# Altium footprint library custom-case.PcbLib: 342 footprints (part 18 of 22)
Each footprint in its own frame and in the unit in brackets; x right, y up, seen from the top. Pads: shape width x height; smd on the part's side, far side on the other; paste and mask are expansions set on the pad; w line width, h text height; cw(c..) or ccw(c..) is an arc to the next point about the centre after c.
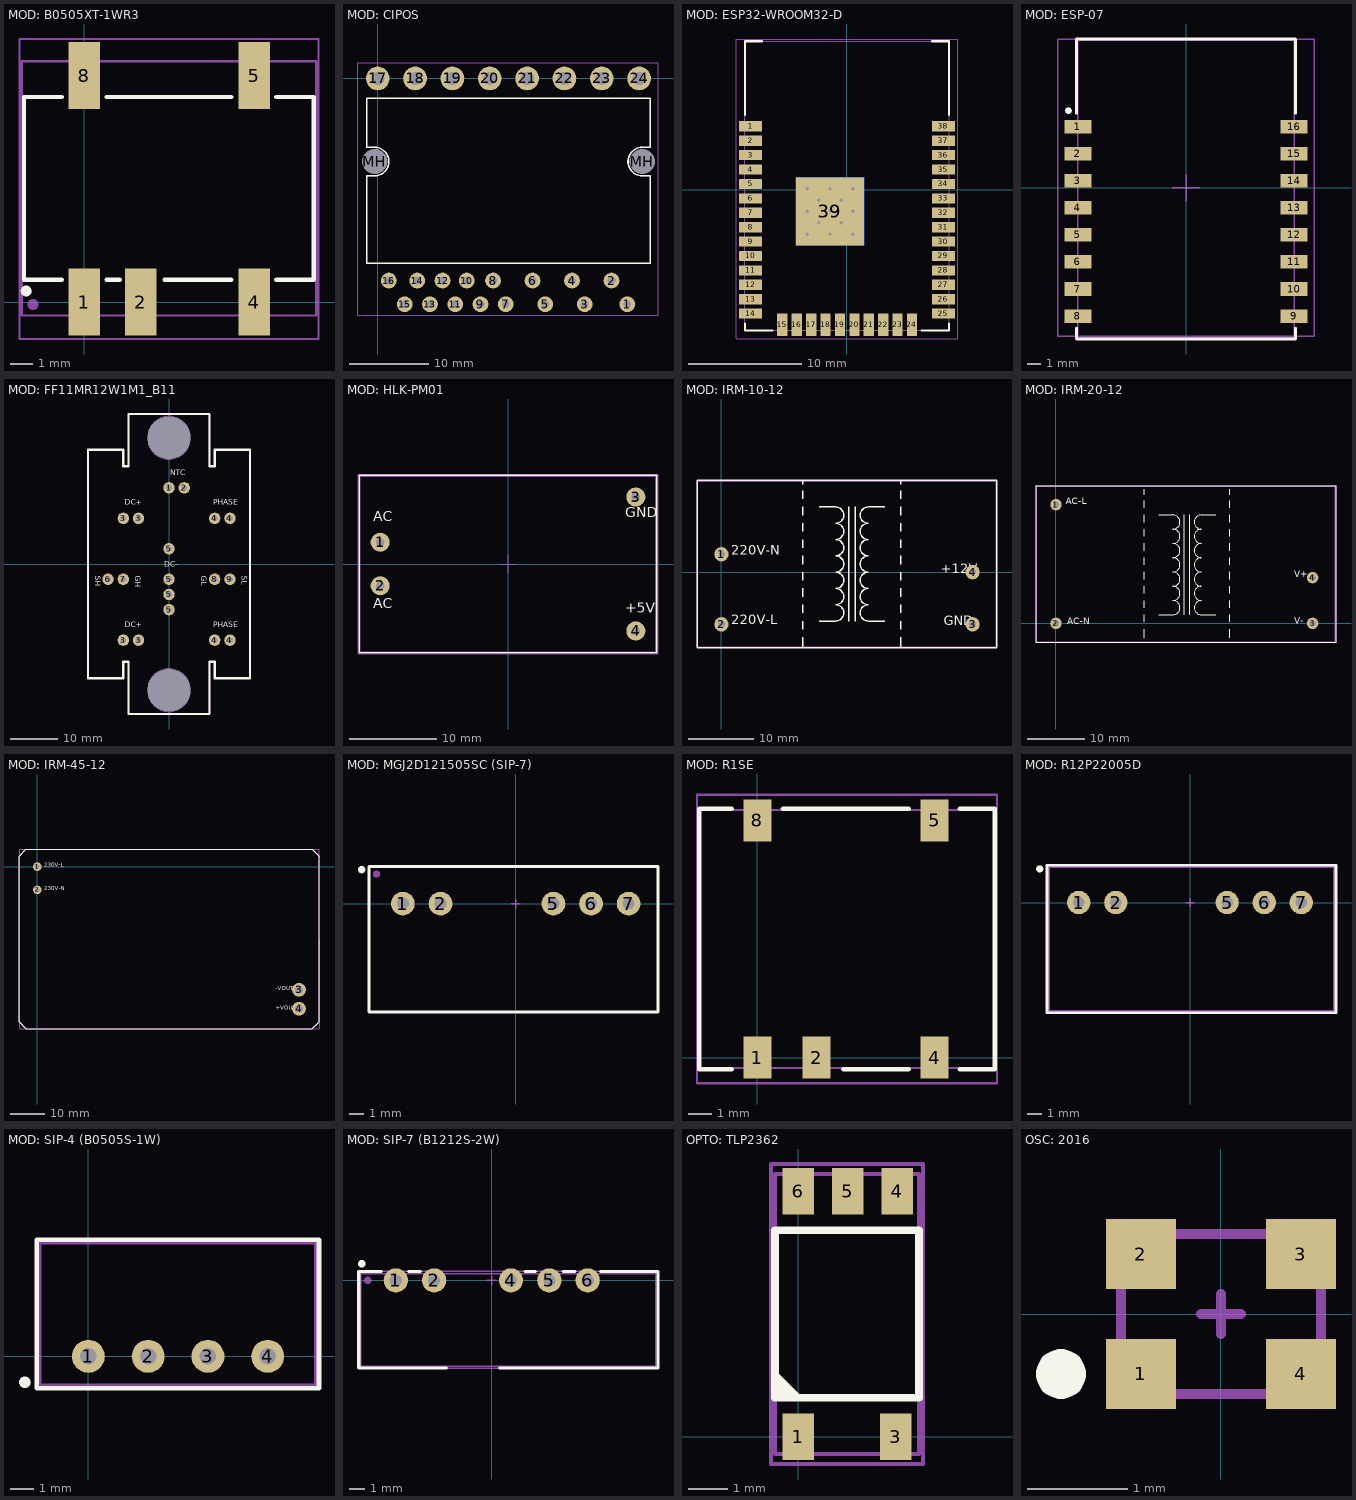
[diagram p17: the footprints below, top view; thin cyan lines are the x and y axes]

## MOD: B0505XT-1WR3 [mm]
pads (7):
  rect 1.4x3 smd: 1(0,0) 2(2.54,0) 4(7.62,0) 5(7.62,10.16) 8(0,10.16)
  round 0.5 on Top Overlay: ""(-2.6,0.5)
  round 0.5 on Mech1: ""(-2.3,-0.1)
Top Overlay:
  lines w0.2: -1,1 -2.7,1 -2.7,9.2 -1,9.2 ; 1,1 1.6,1 ; 1,9.2 6.6,9.2 ; 3.6,1 6.6,1 ; 8.62,1 10.3,1 10.3,9.2 8.62,9.2
Top Assy:
  lines w0.1: -2.8,-0.6 10.4,-0.6 10.4,10.8 -2.8,10.8 -2.8,-0.6
Size Area:
  lines w0.1: -2.897,-1.65 -2.897,11.8 0.4,11.8 10.5,11.8 10.5,-1.65 -2.897,-1.65
3D body "1WR3.STEP": height 7.25, standoff 0, extent -2.8,-0.6 10.4,10.8

## MOD: CIPOS [mm]
pads (26):
  round 2 hole 1 mask+0.075: 1(31.61,-28.6) 2(29.61,-25.6) 3(26.21,-28.6) 4(24.61,-25.6) 5(21.21,-28.6) 6(19.61,-25.6) 7(16.21,-28.6) 8(14.61,-25.6) 9(13.01,-28.6) 10(11.27,-25.6) 11(9.81,-28.6) 12(8.21,-25.6) 13(6.61,-28.6) 14(5.01,-25.6) 15(3.41,-28.6) 16(1.41,-25.6)
  round 3 hole 1.7 mask+0.075: 17(0,0) 18(4.73,0) 19(9.46,0) 20(14.19,0) 21(18.92,0) 22(23.65,0) 23(28.38,0) 24(33.11,0)
  round 3 hole 3.2 mask+0.075: MH(-0.39,-10.525) MH(33.5,-10.525)
Top Overlay:
  lines w0.2: -1.39,-23.4 -1.39,-12.325 -0.39,-12.325 ccw(c-0.39,-10.525) -0.39,-8.725 -1.39,-8.725 -1.39,-2.5 34.5,-2.5 34.5,-8.725 33.5,-8.725 ccw(c33.5,-10.525) 33.5,-12.325 34.5,-12.325 34.51,-23.4 -1.39,-23.4
Top Assy:
  lines w0.1: -1.39,-23.4 34.51,-23.4 34.5,-12.325 33.5,-12.325 cw(c33.5,-10.525) 33.5,-8.725 34.5,-8.725 34.5,-2.5 -1.39,-2.5 -1.39,-8.725 -0.39,-8.725 cw(c-0.39,-10.525) -0.39,-12.325 -1.39,-12.325 -1.39,-23.4
Size Area:
  lines w0.1: -2.5,-30 -2.5,2 35.5,2 35.5,-30 -2.5,-30
3D body "CIPOS.STEP": height 3.9, standoff -3.8, extent -1.59,-29.258 34.71,0.575

## MOD: ESP32-WROOM32-D [mm]
pads (40):
  rect 2x0.9 smd: 1(-8.5,5.6) 2(-8.5,4.33) 3(-8.5,3.06) 4(-8.5,1.79) 5(-8.5,0.52) 6(-8.5,-0.75) 7(-8.5,-2.02) 8(-8.5,-3.29) 9(-8.5,-4.56) 10(-8.5,-5.83) 11(-8.5,-7.1) 12(-8.5,-8.37) 13(-8.5,-9.64) 14(-8.5,-10.91) 25(8.5,-10.91) 26(8.5,-9.64) 27(8.5,-8.37) 28(8.5,-7.1) 29(8.5,-5.83) 30(8.5,-4.56) 31(8.5,-3.29) 32(8.5,-2.02) 33(8.5,-0.75) 34(8.5,0.52) 35(8.5,1.79) 36(8.5,3.06) 37(8.5,4.33) 38(8.5,5.6)
  rect 0.9x2 smd: 15(-5.7,-11.9) 16(-4.43,-11.9) 17(-3.16,-11.9) 18(-1.89,-11.9) 19(-0.62,-11.9) 20(0.65,-11.9) 21(1.92,-11.9) 22(3.19,-11.9) 23(4.46,-11.9) 24(5.73,-11.9)
  rect 6x6 smd far side: 39(-1.5,-1.9)
  rect 6x6 smd: 39(-1.5,-1.9)
via -1.5,-1.9 diameter 0.7 hole 0.3
via -0.5,-0.9 diameter 0.7 hole 0.3
via -2.5,-0.9 diameter 0.7 hole 0.3
via -2.5,-2.9 diameter 0.7 hole 0.3
via -0.5,-2.9 diameter 0.7 hole 0.3
via 0.5,0.1 diameter 0.7 hole 0.3
via 0.5,-3.9 diameter 0.7 hole 0.3
via -3.5,-3.9 diameter 0.7 hole 0.3
via -3.5,0.1 diameter 0.7 hole 0.3
via -1.5,0.1 diameter 0.7 hole 0.3
via 0.5,-1.9 diameter 0.7 hole 0.3
via -1.5,-3.9 diameter 0.7 hole 0.3
via -3.5,-1.9 diameter 0.7 hole 0.3
Top Overlay:
  lines w0.2: -9,-11.8 -9,-12.4 -6.6,-12.4 ; -9,6.6 -9,7.6 -9,13.1 -7.5,13.1 ; 6.6,-12.4 9,-12.4 9,-11.8 ; 7.5,13.1 9,13.1 9,7.6 9,6.6
Top Assy:
  lines w0.1: -9,-12.4 -9,13.1 ; -9,-12.4 9,-12.4 ; -9,-12.4 -9,13.1 ; -9,-12.4 9,-12.4 ; -9,13.1 9,13.1 ; -9,13.1 9,13.1 ; 9,-12.4 9,13.1 ; 9,-12.4 9,13.1
Size Area:
  lines w0.1: -0.25,0.05 0.25,0.05 ; 0,-0.2 0,0.3 ; -9.75,-13.15 9.75,-13.15 9.75,13.3 -9.75,13.3 -9.75,-13.15
3D body "User Library-ESP321.STEP": height 2.91, standoff -0.01, extent -9,-12.4 9,13.1

## MOD: ESP-07 [mm]
pads (17):
  rect 2x1 smd: 1(-8,4.5) 2(-8,2.5) 3(-8,0.5) 4(-8,-1.5) 5(-8,-3.5) 6(-8,-5.5) 7(-8,-7.5) 8(-8,-9.5) 9(8,-9.5) 10(8,-7.5) 11(8,-5.5) 12(8,-3.5) 13(8,-1.5) 14(8,0.5) 15(8,2.5) 16(8,4.5)
  round 0.5 on Top Overlay: ""(-8.7,5.7)
Top Overlay:
  lines w0.2: -8.1,-10.4 -8.1,-11.2 8.1,-11.2 8.1,-10.4 ; -8.1,5.5 -8.1,10.9 -8.1,11 8.1,11 8.1,5.5
Top Assy:
  lines w0.1: -8,-11.1 8,-11.1 8,10.9 -8,10.9 -8,-11.1
Size Area:
  lines w0.1: -1,0 1,0 ; 0,-1 0,1 ; -9.5,-11 -9.5,11 9.5,11 9.5,-11 -9.5,-11
3D body "User Library-ESP07-1.STEP": height 3.5, standoff -0.01, extent -8,-11.1 8,10.9

## MOD: FF11MR12W1M1_B11 [mm]
pads (20):
  round 2.4 hole 1.2: 1(0,16) 2(3.2,16) 3(-9.6,-16) 3(-9.6,9.6) 3(-6.4,-16) 3(-6.4,9.6) 4(9.6,-16) 4(9.6,9.6) 4(12.8,-16) 4(12.8,9.6) 5(0,-9.6) 5(0,-6.4) 5(0,-3.2) 5(0,3.2) 6(-12.8,-3.2) 7(-9.6,-3.2) 8(9.6,-3.2) 9(12.8,-3.2)
  round 0 hole 9: MH(0,-26.5) MH(0,26.5)
Top Overlay:
  lines w0.5: -17,-24 -17,24 -9.6,24 -9.6,20.5 -8.5,20.5 -8.5,31.5 0,31.5 8.5,31.5 8.5,20.5 9.6,20.5 9.6,24 17,24 17,-24 9.6,-24 9.6,-20.5 8.5,-20.5 8.5,-31.5 0,-31.5 -8.5,-31.5 -8.5,-20.5 -9.6,-20.5 -9.6,-24 -17,-24
  text "PHASE" at 9.25,12 h2
  text "PHASE" at 9.25,-13.75 h2
  text "NTC" at 0.25,18.25 h2
  text "DC+" at -9.25,12 h2
  text "DC+" at -9.25,-13.75 h2
  text "DC-" at -1,-1 h2
  text "GH" at -7.5,-2.5 h2
  text "SH" at -15.9,-2.5 h2
  text "SL" at 14.9,-2.5 h2
  text "GL" at 6.4,-2.5 h2
Top Assy:
  circle w0.1: c0,26.5 r4.5
  circle w0.1: c0,-26.5 r4.5
  lines w0.1: -17,-24 -17,24 -9.6,24 -9.6,20.5 -8.5,20.5 -8.5,31.5 0,31.5 8.5,31.5 8.5,20.5 9.6,20.5 9.6,24 17,24 17,-24 9.6,-24 9.6,-20.5 8.5,-20.5 8.5,-31.5 0,-31.5 -8.5,-31.5 -8.5,-20.5 -9.6,-20.5 -9.6,-24 -17,-24
3D body "FF11MR12W1M1_B11.step": height 1.4, standoff -15, extent -16.9,-31.4 16.9,31.4

## MOD: HLK-PM01 [mm]
height 15
pads (4):
  round 2.2 hole 1: 1(-14.7,2.5) 2(-14.7,-2.5) 3(14.7,7.7) 4(14.7,-7.7)
Top Overlay:
  lines w0.2: -17.1,-10.2 -17.1,10.2 17.1,10.2 17.1,-10.2 -0.2,-10.2 -17.1,-10.2
  text "GND" at 13.5,5 h2
  text "+5V" at 13.5,-6 h2
  text "AC" at -15.5,-5.5 h2
  text "AC" at -15.5,4.5 h2
Top Assy:
  lines w0.1: -17,-10.1 -17,10.1 17,10.1 17,-10.1 -17,-10.1
Size Area:
  lines w0.1: -1,0 1,0 ; 0,-1 0,1 ; -17.25,-10.35 17.25,-10.35 17.25,10.35 -17.25,10.35 -17.25,-10.35
3D body "HLK-PM01.STEP": height 15.07, standoff -4.95, extent -17,-10.1 17,10.1

## MOD: IRM-10-12 [mm]
pads (4):
  round 2.2 hole 1.1: 1(0,2.75) 2(0,-8) 3(38.5,-8) 4(38.5,0)
Top Overlay:
  lines w0.2: 12.5,-11.5 12.5,-10 ; 12.5,-8.75 12.5,-7.5 ; 12.5,-6.25 12.5,-5 ; 12.5,-3.75 12.5,-2.5 ; 12.5,-1.25 12.5,0 ; 12.5,1.25 12.5,2.5 ; 12.5,3.75 12.5,5 ; 12.5,6.25 12.5,7.5 ; 12.5,8.75 12.5,10 ; 12.5,11.25 12.5,12.5 ; 12.5,13.5 12.5,14 ; 15,-7.5 17.5,-7.5 ccw(c17.5,-6.25) 17.5,-5 ccw(c17.5,-3.75) 17.5,-2.5 ccw(c17.5,-1.25) 17.5,0 ccw(c17.5,1.25) 17.5,2.5 ccw(c17.5,3.75) 17.5,5 ccw(c17.5,6.25) 17.5,7.5 ccw(c17.5,8.75) 17.5,10 15,10 ; 19.5,-7.5 19.5,10 ; 20.5,-7.5 20.5,10 ; 25,-7.5 22.5,-7.5 cw(c22.5,-6.25) 22.5,-5 cw(c22.5,-3.75) 22.5,-2.5 cw(c22.5,-1.25) 22.5,0 cw(c22.5,1.25) 22.5,2.5 cw(c22.5,3.75) 22.5,5 cw(c22.5,6.25) 22.5,7.5 cw(c22.5,8.75) 22.5,10 25,10 ; 27.5,-11.5 27.5,-10 ; 27.5,-8.75 27.5,-7.5 ; 27.5,-6.25 27.5,-5 ; 27.5,-3.75 27.5,-2.5 ; 27.5,-1.25 27.5,0 ; 27.5,1.25 27.5,2.5 ; 27.5,3.75 27.5,5 ; 27.5,6.25 27.5,7.5 ; 27.5,8.75 27.5,10 ; 27.5,11.25 27.5,12.5 ; 27.5,13.5 27.5,14 ; -3.75,-11.6 -3.75,14.1 42.25,14.1 42.25,-11.6 -3.75,-11.6
  text "GND" at 34.1,-8.7 h2.5
  text "+12V" at 33.6,-0.7 h2.5
  text "220V-L" at 1.5,-8.5 h2.5
  text "220V-N" at 1.5,2.1 h2.5
Top Assy:
  lines w0.1: -3.6,-11.45 42.099,-11.45 42.099,13.95 -3.6,13.95 -3.6,-11.45
Size Area:
  lines w0.1: -3.7,-11.55 -3.7,14.05 42.2,14.05 42.2,-11.55 -3.7,-11.55
3D body "User Library-IRM-10-12.STEP": height 22.05, standoff -3.5, extent -3.6,-11.45 42.099,13.95

## MOD: IRM-20-12 [mm]
pads (4):
  round 2 hole 1.1: 1(0,20.8) 2(0,0) 3(45,0) 4(45,8)
Top Overlay:
  lines w0.2: 15.5,-2.5 15.5,-1 ; 15.5,0.25 15.5,1.5 ; 15.5,2.75 15.5,4 ; 15.5,5.25 15.5,6.5 ; 15.5,7.75 15.5,9 ; 15.5,10.25 15.5,11.5 ; 15.5,12.75 15.5,14 ; 15.5,15.25 15.5,16.5 ; 15.5,17.75 15.5,19 ; 15.5,20.25 15.5,21.5 ; 15.5,22.5 15.5,23.5 ; 18,1.5 20.5,1.5 ccw(c20.5,2.75) 20.5,4 ccw(c20.5,5.25) 20.5,6.5 ccw(c20.5,7.75) 20.5,9 ccw(c20.5,10.25) 20.5,11.5 ccw(c20.5,12.75) 20.5,14 ccw(c20.5,15.25) 20.5,16.5 ccw(c20.5,17.75) 20.5,19 18,19 ; 22.5,1.5 22.5,19 ; 23.5,1.5 23.5,19 ; 28,1.5 25.5,1.5 cw(c25.5,2.75) 25.5,4 cw(c25.5,5.25) 25.5,6.5 cw(c25.5,7.75) 25.5,9 cw(c25.5,10.25) 25.5,11.5 cw(c25.5,12.75) 25.5,14 cw(c25.5,15.25) 25.5,16.5 cw(c25.5,17.75) 25.5,19 28,19 ; 30.5,-2.5 30.5,-1 ; 30.5,0.25 30.5,1.5 ; 30.5,2.75 30.5,4 ; 30.5,5.25 30.5,6.5 ; 30.5,7.75 30.5,9 ; 30.5,10.25 30.5,11.5 ; 30.5,12.75 30.5,14 ; 30.5,15.25 30.5,16.5 ; 30.5,17.75 30.5,19 ; 30.5,20.25 30.5,21.5 ; 30.5,22.5 30.5,23.5 ; -3.5,-3.3 49.1,-3.3 49.1,24.1 -3.5,24.1 -3.5,-3.3
  text "V+" at 41.8,7.6 h2
  text "V-" at 41.8,-0.5 h2
  text "AC-N" at 2,-0.6 h2
  text "AC-L" at 1.7,20.4 h2
Top Assy:
  lines w0.1: -3.4,-3.2 49,-3.2 49,24 -3.4,24 -3.4,-3.2
  text "V+" at 41.8,7.6 h2
  text "V-" at 41.8,-0.5 h2
  text "AC-N" at 2,-0.6 h2
  text "AC-L" at 1.7,20.4 h2
Size Area:
  lines w0.1: -3.5,-3.3 -3.5,24.1 49.1,24.1 49.1,-3.3 -3.5,-3.3
3D body "IRM-20-12.STEP": height 24, standoff -3, extent -3.4,-3.2 49,24

## MOD: IRM-45-12 [mm]
pads (4):
  round 2.5 hole 1.2: 1(0,0) 2(0,-6.75)
  round 4 hole 2.2: 3(76,-35.75) 4(76,-41.25)
Top Overlay:
  lines w0.2: -5.3,3 -5.3,-45.05 -3.3,-47.05 79.8,-47.05 81.8,-45.05 81.8,3 79.8,5 -3.3,5 -5.3,3 ; -5.3,3 -5.3,3
  text "-VOUT" at 69.25,-36.25 h2
  text "+VOUT" at 69.25,-42 h2
  text "230V-L" at 2,-0.5 h2
  text "230V-N" at 2,-7.25 h2
Top Assy:
  lines w0.1: -5.3,-45.05 -3.25,-47.1 79.75,-47.1 81.8,-45.05 81.8,3 79.8,5 -3.3,5 -5.3,3 -5.3,-45.05
  text "-VOUT" at 69.25,-36.25 h2
  text "+VOUT" at 69.25,-42 h2
  text "230V-N" at 2,-7.25 h2
  text "230V-L" at 2,-0.5 h2
Size Area:
  lines w0.1: -5.3,-47.1 -5.3,5.1 81.8,5.1 81.8,-47.1 -5.3,-47.1
3D body "IRM-45-15.step": height 29.51, standoff -3.5, extent -5.25,-47 81.75,5

## MOD: MGJ2D121505SC (SIP-7) [mm]
pads (7):
  round 1.6 hole 0.8: 1(-7.62,0) 2(-5.08,0) 5(2.54,0) 6(5.08,0) 7(7.62,0)
  round 0.5 on Top Overlay: ""(-10.4,2.3)
  round 0.5 on Mech1: ""(-9.4,2)
Top Overlay:
  lines w0.2: -9.9,-7.32 9.6,-7.32 9.6,2.5 -9.9,2.5 -9.9,-7.32
Top Assy:
  lines w0.1: -9.9,-7.32 9.6,-7.32 9.6,2.5 -9.9,2.5 -9.9,-7.32
Size Area:
  lines w0.1: -0.3,0 0.3,0 ; 0,-0.3 0,0.3 ; -9.9,-7.32 9.6,-7.32 9.6,2.5 -9.9,2.5 -9.9,-7.32
3D body "mps_dcdc_mgj2d_sc_a.step": height 12.6, standoff -4, extent -9.9,-7.32 9.6,2.5

## MOD: R1SE [mm]
pads (5):
  rect 1.2x1.8 smd: 1(0,0) 2(2.54,0) 4(7.62,0) 5(7.62,10.2) 8(0,10.2)
Top Overlay:
  lines w0.2: -1.1,-0.5 -2.5,-0.5 -2.5,10.7 -1.1,10.7 ; 1.1,10.7 6.5,10.7 ; 3.7,-0.5 6.5,-0.5 ; 8.7,-0.5 10.2,-0.5 10.2,10.7 8.7,10.7
Top Assy:
  lines w0.1: -2.525,-0.45 10.225,-0.45 10.225,10.65 -2.525,10.65 -2.525,-0.45
Size Area:
  lines w0.1: -2.6,-1.1 -2.6,11.3 10.3,11.3 10.3,-1.1 -2.6,-1.1
3D body "User Library-RECOM_R1S-xxxx.STEP": height 7, standoff 0, extent -2.525,-0.45 10.225,10.65

## MOD: R12P22005D [mm]
pads (6):
  round 1.6 hole 0.8: 1(-7.62,0) 2(-5.08,0) 5(2.54,0) 6(5.08,0) 7(7.62,0)
  round 0.5 on Top Overlay: ""(-10.3,2.3)
Top Overlay:
  lines w0.2: -9.8,-7.55 -9.8,2.55 10,2.55 10,-7.55 -9.8,-7.55
Top Assy:
  lines w0.1: -9.65,-7.4 -9.65,2.4 9.85,2.4 9.85,-7.4 -9.65,-7.4
Size Area:
  lines w0.1: -0.3,0 0.3,0 ; 0,-0.3 0,0.3 ; -9.75,-7.5 -9.75,2.5 9.95,2.5 9.95,-7.5 -9.75,-7.5
3D body "SIP-7 (19.5x9.8x12.5).STEP": height 12.51, standoff -4.09, extent -9.65,-7.4 9.85,2.4

## MOD: SIP-4 (B0505S-1W) [mm]
pads (5):
  round 1.4 hole 0.7: 1(0,0) 2(2.54,0) 3(5.08,0) 4(7.62,0)
  round 0.5 on Top Overlay: ""(-2.7,-1.1)
Top Overlay:
  lines w0.2: -2.2,-1.35 9.8,-1.35 9.8,4.95 -2.2,4.95 -2.2,-1.35
Top Assy:
  lines w0.1: -2.042,-1.2 9.642,-1.2 9.642,4.8 -2.042,4.8 -2.042,-1.2
Size Area:
  lines w0.1: -2.15,-1.3 9.75,-1.3 9.75,4.9 -2.15,4.9 -2.15,-1.3
3D body "User Library-4-Lead SIP_AM1S-1205SZ_Aimtec_DC-DC_Converter_1_Watt.STEP": height 10.2, standoff -3, extent -2.042,-1.2 9.642,4.8

## MOD: SIP-7 (B1212S-2W) [mm]
pads (7):
  round 1.6 hole 0.8: 1(-6.35,0) 2(-3.81,0) 4(1.27,0) 5(3.81,0) 6(6.35,0)
  round 0.5 on Top Overlay: ""(-8.6,1.1)
  round 0.5 on Mech1: ""(-8.21,0)
Top Overlay:
  lines w0.2: -7.3,0.6 -8.8,0.6 -8.8,-5.8 -3,-5.8 ; -5.5,0.6 -4.7,0.6 ; 0.5,-5.8 11,-5.8 11,0.6 7.2,0.6 ; 2.2,0.6 2.9,0.6 ; 4.7,0.6 5.5,0.6
Top Assy:
  lines w0.1: -8.66,-5.67 10.84,-5.67 10.84,0.45 -8.66,0.45 -8.66,-5.67
Size Area:
  lines w0.1: -0.3,0 0.3,0 ; 0,-0.3 0,0.3 ; -8.8,-5.8 -8.8,0.6 11,0.6 11,-5.8 -8.8,-5.8
3D body "User Library-Traco TMA 0505S.STEP": height 10.2, standoff -3.2, extent -8.66,-5.67 10.84,0.45

## OPTO: TLP2362 [mm]
pads (6):
  rect 0.8x1.2 smd: 1(0,0) 3(2.5,0) 4(2.54,6.3) 5(1.27,6.3) 6(0,6.3)
  round 0.5 on Mech1: ""(-0.1,0.1)
Top Overlay:
  region: -0.6,1 0.12,1 -0.6,1.72
  lines w0.2: -0.6,1 3.1,1 3.1,5.3 -0.6,5.3 -0.6,1
Top Assy:
  lines w0.1: -0.6,-0.439 3.1,-0.439 3.1,6.739 -0.6,6.739 -0.6,-0.439
Size Area:
  lines w0.1: -0.7,-0.7 3.2,-0.7 3.2,7 -0.7,7 -0.7,-0.7
3D body "TLP2362.STEP": height 2.22, standoff -0.03, extent -0.6,-0.439 3.1,6.739

## OSC: 2016 [mm]
pads (5):
  rect 0.7x0.7 smd: 1(-0.8,-0.6) 2(-0.8,0.6) 3(0.8,0.6) 4(0.8,-0.6)
  round 0.5 on Top Overlay: ""(-1.6,-0.6)
Top Assy:
  lines w0.1: -1,-0.8 1,-0.8 1,0.8 -1,0.8 -1,-0.8
Size Area:
  lines w0.1: -0.2,0 0.2,0 ; 0,-0.2 0,0.2 ; -1,-0.8 1,-0.8 1,0.8 -1,0.8 -1,-0.8
3D body "User Library-XRCGB27M000F2P00R0.STEP": height 0.65, standoff 0, extent -1,-0.8 1,0.8